# Altium schematic symbol library TBP02R1-381-03GR.SchLib: 1 symbol
Pins are listed as number, name and electrical type; pins without a type are passive.

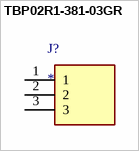
[diagram p0: symbol TBP02R1-381-03GR]

## TBP02R1-381-03GR
designator J?
2~24 Poles, Pluggable,Receptacle, Horizontal, 3.81 Pitch, Terminal Block Connector; MF: Same Sky; MP: TBP02R1-381-03GR; SnapEDA_Link: https://www.snapeda.com/parts/TBP02R1-381-03GR/Same+Sky/view-part/?ref=snap; Package: None; Value: *; Check_prices: https://www.snapeda.com/parts/TBP02R1-381-03GR/Same+Sky/view-part/?ref=eda
footprint TBP02R1-381-03GR (Conn)
footprint TBP02R1-381-03GR
pins: 1, 2, 3